# Altium footprint library huan_basic.PcbLib: 138 footprints (part 7 of 9)
Each footprint in its own frame and in the unit in brackets; x right, y up, seen from the top. Pads: shape width x height; smd on the part's side, far side on the other; paste and mask are expansions set on the pad; w line width, h text height; cw(c..) or ccw(c..) is an arc to the next point about the centre after c.
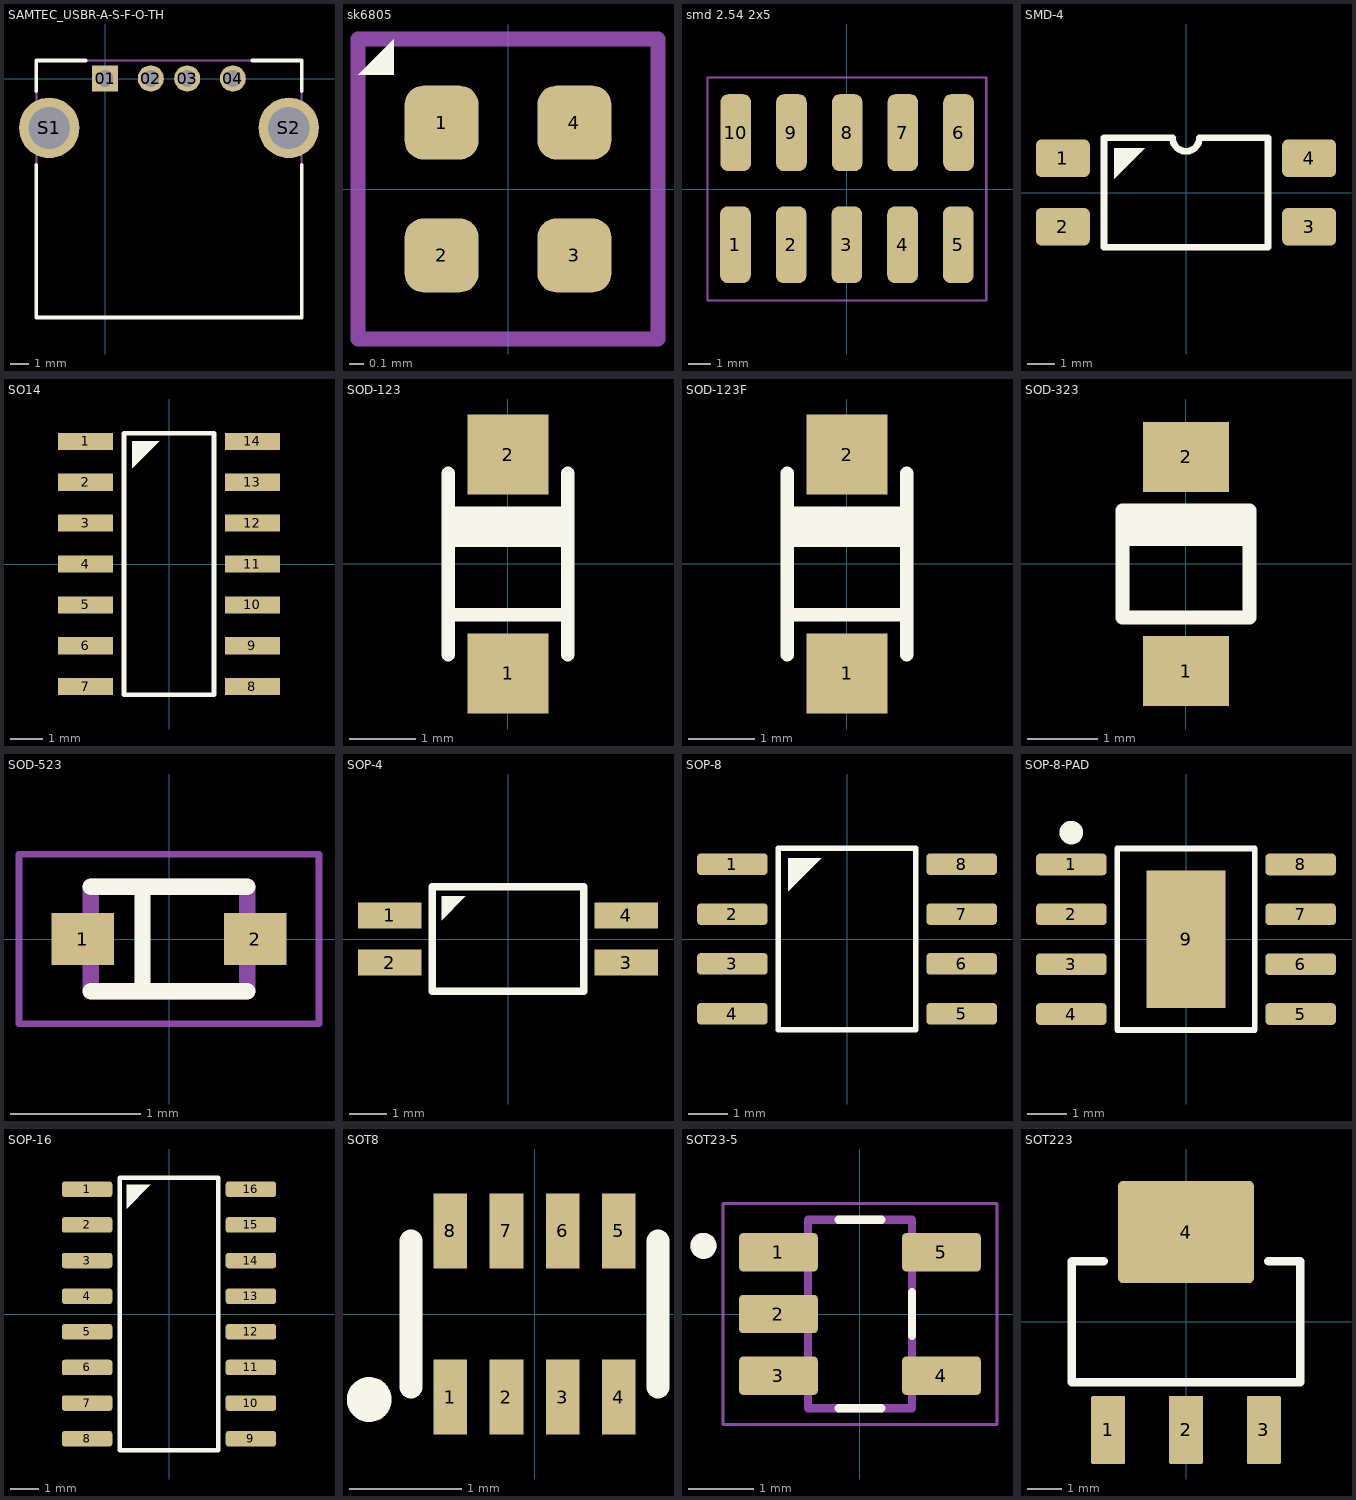
[diagram p6: the footprints below, top view; thin cyan lines are the x and y axes]

## SAMTEC_USBR-A-S-F-O-TH [mm]
pads (6):
  rect 1.428x1.428 hole 0.92: 01(0,0)
  round 1.428 hole 0.92: 02(2.5,0) 03(4.5,0) 04(7,0)
  round 3.316 hole 2.3: S1(-3.07,-2.71) S2(10.07,-2.71)
Top Overlay:
  lines w0.2: -3.775,-4.73 -3.775,-13.11 10.775,-13.11 10.775,-4.73 ; -3.775,-0.69 -3.775,0.99 -1.07,0.99 ; 8.07,0.99 10.775,0.99 10.775,-0.69
Mechanical 13:
  lines w0.1: -3.775,0.99 -3.775,-13.11 10.775,-13.11 10.775,0.99
Mechanical 15:
  lines w0.1: -3.775,0.99 10.775,0.99
3D body "USBR-A-S-F-O-TH.step": height 7.5, standoff -3.85, extent -4.348,-13.107 11.348,1.193

## sk6805 [mm]
pads (4):
  rrect50% 0.5x0.5 smd: 1(-0.45,0.45) 2(-0.45,-0.45) 3(0.45,-0.45) 4(0.45,0.45)
Top Overlay:
  region: -0.773,0.773 -1.016,0.773 -0.773,1.016
Mechanical 15:
  lines w0.1: -1.016,-1.016 -1.016,1.016 1.016,1.016 1.016,-1.016 -1.016,-1.016
3D body "sk6805-ec14.stp": height 0.39, standoff -0.01, extent -0.7,-0.7 0.7,0.7

## smd 2.54 2x5 [mm]
pads (10):
  rrect50% 1.4x3.5 smd: 1(-5.08,-2.54) 2(-2.54,-2.54) 3(0,-2.54) 4(2.54,-2.54) 5(5.08,-2.54) 6(5.093,2.57) 7(2.553,2.57) 8(0.013,2.57) 9(-2.527,2.57) 10(-5.067,2.57)
Mechanical 1:
  lines w0.1: -6.35,-5.08 -6.35,5.08 6.35,5.08 6.35,-5.08 -6.35,-5.08
3D body "pin_header_a-sl254-dg-g10mp1.stp": height 10, standoff 0.26, extent -6.35,-3.75 6.35,3.75

## SMD-4 [mm]
pads (4):
  rrect30% 2x1.4 smd: 1(-4.572,1.27) 2(-4.572,-1.27) 3(4.572,-1.27) 4(4.572,1.27)
Top Overlay:
  region: -2.667,1.651 -1.524,1.651 -2.667,0.508
  lines w0.254: -3.048,-2.032 -3.048,2.032 -0.5,2.032 ccw(c0,2.032) 0.5,2.032 3.048,2.032 3.048,-2.032 -3.048,-2.032
3D body "PC817X2NIP0F--3DModel-STEP-56544.STEP": height 4, standoff 0, extent -5,-2.29 5,2.29

## SO14 [mil]
pads (14):
  rect 67x21 smd: 1(-102,150) 2(-102,100) 3(-102,50) 4(-102,0) 5(-102,-50) 6(-102,-100) 7(-102,-150) 8(102,-150) 9(102,-100) 10(102,-50) 11(102,0) 12(102,50) 13(102,100) 14(102,150)
Top Overlay:
  region: -12,150 -45,117 -45,150
  lines w5.91: -55,-160 -55,160 55,160 55,-160 -55,-160
3D body "CircuitWorks-SO-14 (PIC16F684).step": height 62.99, standoff 0, extent -117.92,-171.06 117.91,171.07

## SOD-123 [mm]
pads (2):
  rect 1.22x1.2 smd: 1(0,-1.646) 2(0,1.646)
Top Overlay:
  rectangle: -0.9,0.254 0.9,0.683
  lines w0.2: -0.9,-1.366 -0.9,-0.762 ; -0.9,1.366 -0.9,0.762 ; 0.9,-1.366 0.9,-0.762 ; 0.9,1.366 0.9,0.762 ; -0.9,-0.762 -0.9,0.762 ; -0.9,-0.762 0.9,-0.762 ; -0.9,0.762 0.9,0.762 ; 0.9,-0.762 0.9,0.762
3D body "SOD-123.step": height 1.36, standoff 0, extent -0.85,-1.925 0.85,1.925

## SOD-123F [mm]
pads (2):
  rect 1.22x1.2 smd: 1(0,-1.646) 2(0,1.646)
Top Overlay:
  rectangle: -0.9,0.254 0.9,0.683
  lines w0.2: -0.9,-1.366 -0.9,-0.762 ; -0.9,1.366 -0.9,0.762 ; 0.9,-1.366 0.9,-0.762 ; 0.9,1.366 0.9,0.762 ; -0.9,-0.762 -0.9,0.762 ; -0.9,-0.762 0.9,-0.762 ; -0.9,0.762 0.9,0.762 ; 0.9,-0.762 0.9,0.762
3D body "SOD-123F.step": height 1.02, standoff 0, extent -0.9,-1.9 0.9,1.9

## SOD-323 [mm]
pads (2):
  rect 1.22x1 smd: 1(0,-1.519) 2(0,1.519)
Top Overlay:
  rectangle: -0.9,0.254 0.9,0.683
  lines w0.2: -0.9,-0.762 -0.9,0.762 0.9,0.762 0.9,-0.762 -0.9,-0.762
3D body "SOD-323.step": height 1.16, standoff 0, extent -0.75,-1.425 0.75,1.425

## SOD-523 [mm]
height 0.7
pads (2):
  rect 0.48x0.4 smd: 1(-0.66,0) 2(0.66,0)
Top Overlay:
  lines w0.12: -0.203,-0.4 -0.203,0.4
  lines w0.127: -0.6,-0.4 0.6,-0.4 ; -0.6,0.4 0.6,0.4
Mechanical 13:
  lines w0.127: -0.6,-0.4 -0.6,0.4 0.6,0.4 0.6,-0.4 -0.6,-0.4
Mechanical 15:
  lines w0.05: -1.15,-0.65 1.15,-0.65 1.15,0.65 -1.15,0.65 -1.15,-0.65
3D body "step_temp.STEP": height 0.7, standoff 0, extent -0.8,-0.4 0.8,0.4

## SOP-4 [mm]
pads (4):
  rect 1.7x0.7 smd: 1(-3.175,0.635) 2(-3.175,-0.635) 3(3.175,-0.635) 4(3.175,0.635)
Top Overlay:
  region: -1.778,1.143 -1.143,1.143 -1.778,0.508
  lines w0.2: -2.032,-1.397 2.032,-1.397 2.032,1.397 -2.032,1.397 -2.032,-1.397
3D body "User Library-SOP-4-1.STEP": height 2.1, standoff 0, extent -3.5,-1.4 3.5,1.4

## SOP-8 [mm]
pads (8):
  rrect35% 1.8x0.55 smd: 1(-2.921,1.905) 2(-2.921,0.635) 3(-2.921,-0.635) 4(-2.921,-1.905) 5(2.921,-1.905) 6(2.921,-0.635) 7(2.921,0.635) 8(2.921,1.905)
Top Overlay:
  region: -0.66,2.057 -1.499,1.219 -1.499,2.057
  lines w0.15: -1.753,-2.311 -1.753,2.311 1.753,2.311 1.753,-2.311 -1.753,-2.311
3D body "SOP-8.x_b": height 1.87, standoff 0, extent -3.11,-2.5 3.11,2.5

## SOP-8-PAD [mm]
pads (9):
  rrect35% 1.8x0.55 smd: 1(-2.921,1.905) 2(-2.921,0.635) 3(-2.921,-0.635) 4(-2.921,-1.905) 5(2.921,-1.905) 6(2.921,-0.635) 7(2.921,0.635) 8(2.921,1.905)
  rect 2x3.5 smd: 9(0,0)
Top Overlay:
  circle w0.4: c-2.921,2.718 r0.1
  lines w0.15: -1.753,-2.311 1.753,-2.311 1.753,2.311 -1.753,2.311 -1.753,-2.311
3D body "SOP-8.x_b": height 1.87, standoff 0, extent -3.11,-2.5 3.11,2.5

## SOP-16 [mm]
pads (16):
  rrect35% 1.8x0.55 smd: 1(-2.921,4.445) 2(-2.921,3.175) 3(-2.921,1.905) 4(-2.921,0.635) 5(-2.921,-0.635) 6(-2.921,-1.905) 7(-2.921,-3.175) 8(-2.921,-4.445) 9(2.921,-4.445) 10(2.921,-3.175) 11(2.921,-1.905) 12(2.921,-0.635) 13(2.921,0.635) 14(2.921,1.905) 15(2.921,3.175) 16(2.921,4.445)
Top Overlay:
  region: -0.66,4.597 -1.499,3.759 -1.499,4.597
  lines w0.15: -1.753,-4.851 1.753,-4.851 1.753,4.851 -1.753,4.851 -1.753,-4.851
3D body "CH340_SMD.STEP": height 1.77, standoff 0, extent -3,-4.95 3,4.95

## SOT8 [mm]
pads (8):
  rect 0.3x0.67 smd mask+0.06: 1(-0.75,-0.74) 2(-0.25,-0.74) 3(0.25,-0.74) 4(0.75,-0.74) 5(0.75,0.74) 6(0.25,0.74) 7(-0.25,0.74) 8(-0.75,0.74)
Top Overlay:
  circle w0.2: c-1.473,-0.762 r0.1
  lines w0.203: -1.1,-0.65 -1.1,0.65 ; 1.1,-0.65 1.1,0.65
3D body "step_temp.STEP": height 0.6, standoff 0, extent -1.05,-0.8 1.05,0.8

## SOT23-5 [mm]
height 1.45
pads (5):
  rrect20% 1.21x0.59 smd: 1(-1.255,0.95) 2(-1.255,0) 3(-1.255,-0.95) 4(1.255,-0.95) 5(1.255,0.95)
Top Overlay:
  circle w0.2: c-2.41,1.05 r0.1
  lines w0.127: -0.33,-1.45 0.33,-1.45 ; -0.33,1.45 0.33,1.45 ; 0.8,-0.335 0.8,0.335
Mechanical 13:
  circle w0.2: c-2.41,1.05 r0.1
  lines w0.127: -0.8,-1.45 -0.8,1.45 0.8,1.45 0.8,-1.45 -0.8,-1.45
Mechanical 15:
  lines w0.05: -2.11,-1.7 2.11,-1.7 2.11,1.7 -2.11,1.7 -2.11,-1.7
3D body "step_temp.STEP": height 1.45, standoff 0, extent -1.4,-1.45 1.4,1.45

## SOT223 [mm]
pads (4):
  rrect10% 1x2 smd: 1(-2.286,-3.175) 2(0,-3.175) 3(2.286,-3.175)
  rrect10% 4x3 smd: 4(0,2.634)
Top Overlay:
  lines w0.254: -2.413,1.778 -3.35,1.778 -3.35,-1.778 3.35,-1.778 3.35,1.778 2.413,1.778
3D body "sot223_p2-3_l6-7_w3-7.stp": height 1.8, standoff 0, extent -3.35,-3.65 3.35,3.65